# Altium footprint library KM_ALTIUM.PcbLib: 265 footprints (part 10 of 17)
Each footprint in its own frame and in the unit in brackets; x right, y up, seen from the top. Pads: shape width x height; smd on the part's side, far side on the other; paste and mask are expansions set on the pad; w line width, h text height; cw(c..) or ccw(c..) is an arc to the next point about the centre after c.
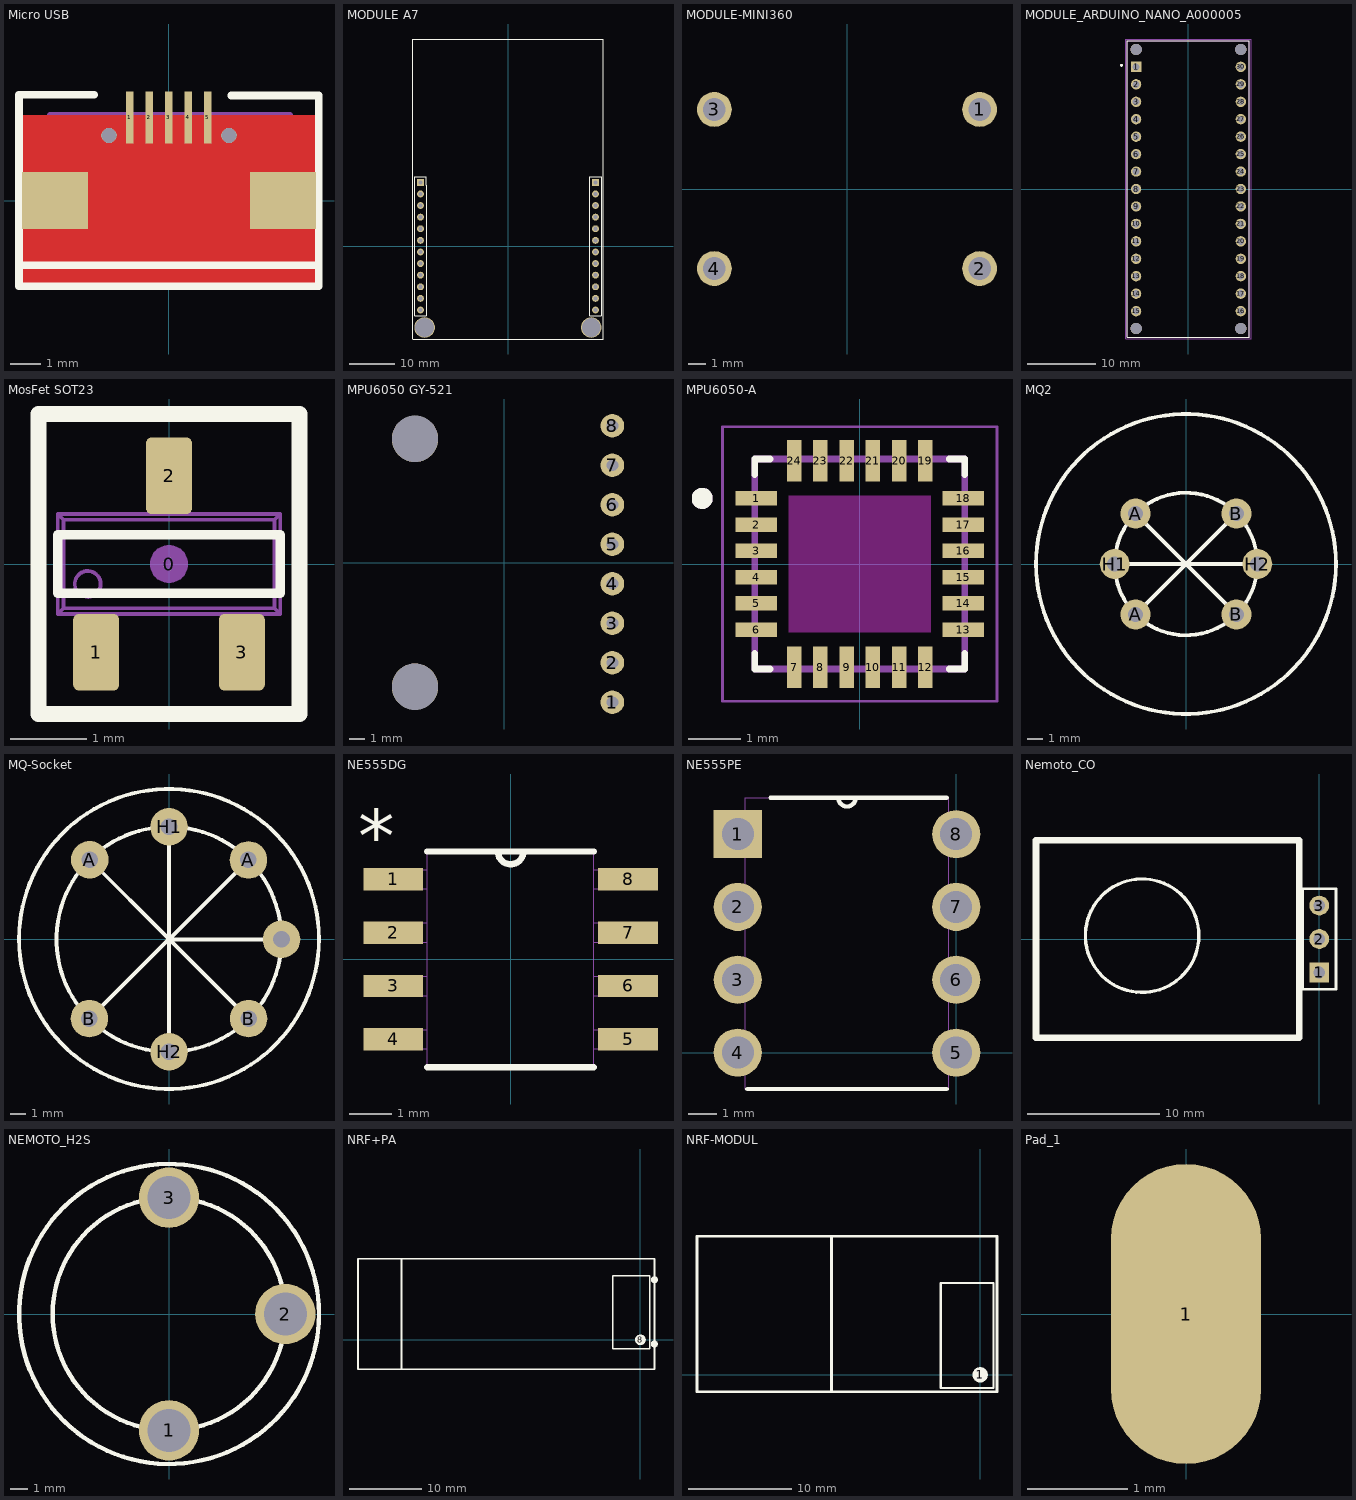
[diagram p9: the footprints below, top view; thin cyan lines are the x and y axes]

## Micro USB [mm]
pads (9):
  rect 0.25x1.75 smd: 1(-1.3,2.774) 2(-0.65,2.774) 3(0,2.774) 4(0.65,2.774) 5(1.3,2.774)
  rect 2.2x1.9 smd: ""(-3.8,0) ""(3.8,0)
  round 0.5 hole 0.5: ""(-2,2.175) ""(2,2.175)
Top Layer:
  pour cut-out: -4.978,-2.87 -4.978,2.851 5.004,2.851 4.978,-2.845
Top Overlay:
  lines w0.254: -5,-2.15 5,-2.15 ; -2.5,3.531 -5,3.531 -5,-2.85 5,-2.85 5,3.505 2.083,3.505
Mechanical 1:
  lines w0.203: -3.961,2.851 -3.955,2.845 -3.955,-2.743 4.033,-2.743 4.033,2.851 -3.961,2.851
3D body "1981568-1.stp": height 2.79, standoff -0.29, extent -3.961,-2.749 4.039,2.851

## MODULE A7 [mm]
pads (26):
  rect 1.5x1.5 hole 0.9: 1(-19.152,13.97) 24(19.152,13.97)
  round 1.5 hole 0.9: 2(-19.152,11.43) 3(-19.152,8.89) 4(-19.152,6.35) 5(-19.152,3.81) 6(-19.152,1.27) 7(-19.152,-1.27) 8(-19.152,-3.81) 9(-19.152,-6.35) 10(-19.152,-8.89) 11(-19.152,-11.43) 12(-19.152,-13.97) 13(19.152,-13.97) 14(19.152,-11.43) 15(19.152,-8.89) 16(19.152,-6.35) 17(19.152,-3.81) 18(19.152,-1.27) 19(19.152,1.27) 20(19.152,3.81) 21(19.152,6.35) 22(19.152,8.89) 23(19.152,11.43)
  round 4.5 hole 4.1: ""(-18.263,-17.805) ""(18.212,-17.805)
Top Overlay:
  lines w0.2: -20.422,-15.24 -20.422,15.24 -17.882,15.24 -17.882,13.335 -17.882,-15.24 -20.422,-15.24 ; 17.882,-15.24 20.422,-15.24 20.422,15.24 17.882,15.24 17.882,-15.24
  lines w0.254: -20.865,-20.32 20.865,-20.32 20.865,45.34 -20.865,45.34 -20.865,-20.295

## MODULE-MINI360 [mm]
pads (4):
  round 2 hole 1.3 mask+0: 1(7.62,4.572) 2(7.62,-4.572) 3(-7.62,4.572) 4(-7.62,-4.572)
3D body "MIni - 360.step": height 3.75, standoff 0, extent -9,-6 9,6

## MODULE_ARDUINO_NANO_A000005 [mm]
pads (34):
  rect 1.508x1.508 / inner round 1.508 / far side rect 1.508x1.508 hole 1: 1(-7.62,17.78)
  round 1.508 hole 1: 2(-7.62,15.24) 3(-7.62,12.7) 4(-7.62,10.16) 5(-7.62,7.62) 6(-7.62,5.08) 7(-7.62,2.54) 8(-7.62,0) 9(-7.62,-2.54) 10(-7.62,-5.08) 11(-7.62,-7.62) 12(-7.62,-10.16) 13(-7.62,-12.7) 14(-7.62,-15.24) 15(-7.62,-17.78) 16(7.62,-17.78) 17(7.62,-15.24) 18(7.62,-12.7) 19(7.62,-10.16) 20(7.62,-7.62) 21(7.62,-5.08) 22(7.62,-2.54) 23(7.62,0) 24(7.62,2.54) 25(7.62,5.08) 26(7.62,7.62) 27(7.62,10.16) 28(7.62,12.7) 29(7.62,15.24) 30(7.62,17.78)
  round 1.651 hole 1.651 unplated: ""(-7.62,-20.32) ""(-7.62,20.32) ""(7.62,-20.32) ""(7.62,20.32)
Top Overlay:
  circle w0.2: c-9.75,18 r0.1
  lines w0.127: -8.89,-21.59 8.89,-21.59 8.89,21.59 -8.89,21.59 -8.89,-21.59
Mechanical 13:
  circle w0.2: c-9.75,18 r0.1
  lines w0.127: -8.89,-21.59 -8.89,21.59 8.89,21.59 8.89,-21.59 -8.89,-21.59
Mechanical 15:
  lines w0.05: -9.14,-21.84 9.14,-21.84 9.14,21.84 -9.14,21.84 -9.14,-21.84
3D body "step_temp.STEP": height 12.6, standoff -6, extent -9,-23.4 9,21.6

## MosFet SOT23 [mm]
pads (4):
  round 0.5 on Mech15: 0(0,0)
  rrect25% 0.6x1 smd: 1(-0.95,-1.15) 2(0,1.15) 3(0.95,-1.15)
Top Overlay:
  lines w0.127: -1.45,-0.381 -1.45,0.381 1.45,0.381 1.45,-0.381 -1.45,-0.381
  lines w0.203: -1.702,-1.956 -1.702,1.956 1.702,1.956 1.702,-1.956 -1.702,-1.956
Mechanical 13:
  circle w0.05: c-1.06,-0.26 r0.169
  lines w0.05: -1.19,-1.19 -0.71,-1.19 ; -1.19,-1.099 -0.71,-1.099 ; -1.19,-1.074 -0.71,-1.074 ; -1.19,-0.825 -0.71,-0.825 ; -1.19,-0.65 -1.19,-1.4 -0.71,-1.4 -0.71,-0.65 ; -0.24,0.65 -0.24,1.4 0.24,1.4 0.24,0.65 ; -0.24,0.825 0.24,0.825 ; -0.24,1.074 0.24,1.074 ; -0.24,1.099 0.24,1.099 ; -0.24,1.19 0.24,1.19 ; 0.71,-1.19 1.19,-1.19 ; 0.71,-1.099 1.19,-1.099 ; 0.71,-1.074 1.19,-1.074 ; 0.71,-0.825 1.19,-0.825 ; 0.71,-0.65 0.71,-1.4 1.19,-1.4 1.19,-0.65 ; -1.45,-0.65 -1.45,0.65 ; -1.45,-0.65 -1.376,-0.576 ; -1.45,-0.65 1.45,-0.65 ; -1.45,0.65 -1.376,0.576 ; -1.45,0.65 1.45,0.65 ; -1.376,-0.576 1.376,-0.576 ; -1.376,-0.576 -1.376,0.576 ; -1.376,0.576 1.376,0.576 ; 1.376,-0.576 1.376,0.576 ; 1.376,-0.576 1.45,-0.65 ; 1.376,0.576 1.45,0.65 ; 1.45,-0.65 1.45,0.65
Mechanical 15:
  lines w0.076: -1.75,-1.9 1.75,-1.9 1.75,1.9 -1.75,1.9 -1.75,-1.9
3D body "SOT23-3.STEP": height 1.29, standoff -0.01, extent -1.45,-1.4 1.45,1.4

## MPU6050 GY-521 [mm] "mODULE"
pads (10):
  round 1.524 hole 0.762: 1(7,-9) 2(7,-6.45) 3(7,-3.9) 4(7,-1.35) 5(7,1.2) 6(7,3.75) 7(7,6.3) 8(7,8.85)
  round 3 hole 3: ""(-5.75,-8) ""(-5.75,8)
3D body "MPU_6050.step": height 3, standoff 0, extent -8,-10.25 8,10.25

## MPU6050-A [mm] "SMD"
height 0.95
pads (24):
  rect 0.79x0.28 smd: 1(-1.97,1.25) 2(-1.97,0.75) 3(-1.97,0.25) 4(-1.97,-0.25) 5(-1.97,-0.75) 6(-1.97,-1.25) 13(1.97,-1.25) 14(1.97,-0.75) 15(1.97,-0.25) 16(1.97,0.25) 17(1.97,0.75) 18(1.97,1.25)
  rect 0.28x0.79 smd: 7(-1.25,-1.97) 8(-0.75,-1.97) 9(-0.25,-1.97) 10(0.25,-1.97) 11(0.75,-1.97) 12(1.25,-1.97) 19(1.25,1.97) 20(0.75,1.97) 21(0.25,1.97) 22(-0.25,1.97) 23(-0.75,1.97) 24(-1.25,1.97)
Top Overlay:
  circle w0.2: c-3,1.25 r0.1
  lines w0.127: -2,-1.705 -2,-2 -1.705,-2 ; -2,1.705 -2,2 -1.705,2 ; 1.705,-2 2,-2 2,-1.705 ; 1.705,2 2,2 2,1.705
Keep-Out Layer:
  region: 1.35,-1.3 -1.35,-1.3 -1.35,1.3 1.35,1.3
Mechanical 13:
  circle w0.2: c-3,1.25 r0.1
  lines w0.127: -2,-2 -2,2 2,2 2,-2 -2,-2
Mechanical 15:
  lines w0.05: -2.615,-2.615 -2.615,2.615 2.615,2.615 2.615,-2.615 -2.615,-2.615
3D body "MPU-6050-A.STEP": height 0.93, standoff -0.02, extent -2,-2 2,2

## MQ2 [mm]
pads (6):
  round 2 hole 1: A(-3.359,3.359) A(-3.359,-3.359) B(3.359,-3.359) B(3.359,3.359) H1(-4.75,0) H2(4.75,0)
Top Overlay:
  circle w0.254: c0,0 r4.75
  circle w0.254: c0,0 r10
  lines w0.254: -4.75,0 4.75,0 0,0 ; -3.359,-3.359 0,0 ; -3.359,3.359 0,0 ; 3.359,-3.359 0,0 ; 3.359,3.359 0,0
3D body "User Library-MQ-5.STEP": height 16.06, standoff -7, extent -9.5,-9.474 9.5,9.526

## MQ-Socket [mm]
pads (7):
  round 2.5 hole 1.1: A(-5.286,5.306) A(5.299,5.292) B(-5.306,-5.286) B(5.306,-5.286) H1(0,7.5) H2(0,-7.5) ""(7.5,0)
Top Overlay:
  circle w0.254: c0,0.02 r10
  circle w0.254: c0,0 r7.5
  lines w0.254: -5.306,-5.286 0,0.02 ; -5.286,5.306 0,0.02 ; 0,-7.5 0,0.02 ; 0,7.5 0,-0.006 ; 5.299,5.292 0,-0.006 ; 5.306,-5.286 0,0.02 ; 7.494,-0.006 0,-0.006
3D body "User Library-socket-7.STEP": height 12.16, standoff -3.48, extent -8.636,-8.449 8.364,8.551

## NE555DG [mil]
pads (8):
  rect 56x21 smd: 1(-110,75) 2(-110,25) 3(-110,-25) 4(-110,-75) 5(110,-75) 6(110,-25) 7(110,25) 8(110,75)
Top Overlay:
  lines w6: -78,-101 78,-101 ; -78,101 -12,101 ; 78,101 12,101 ; -12,101 ccw(c0,101) 12,101 ; -12,101 12,101
  text "*" at -143,91 h50
Mechanical 13:
  lines w0: -12,101 ccw(c0,101) 12,101 ; -12,101 12,101 ; -12,101 -78,101 -78,-101 78,-101 78,101 12,101 ; -124,-84 -124,-66 -78,-66 -78,-84 -124,-84 ; -124,-34 -124,-16 -78,-16 -78,-34 -124,-34 ; -124,16 -124,34 -78,34 -78,16 -124,16 ; -124,66 -124,84 -78,84 -78,66 -124,66 ; 78,-84 78,-66 124,-66 124,-84 78,-84 ; 78,-34 78,-16 124,-16 124,-34 78,-34 ; 78,16 78,34 124,34 124,16 78,16 ; 78,66 78,84 124,84 124,66 78,66
  text "*" at -143,91 h50
3D body "step_temp.STEP": height 68.9, standoff 0, extent -118.11,-96.46 118.11,96.46

## NE555PE [mil]
pads (8):
  rect 66x66 / inner round 66 / far side rect 66x66 hole 44: 1(-300,300)
  round 66 hole 44: 2(-300,200) 3(-300,100) 4(-300,0) 5(0,0) 6(0,100) 7(0,200) 8(0,300)
Top Overlay:
  lines w6: -287,-50 -13,-50 ; -255,350 -162,350 ; -13,350 -138,350 ; -162,350 ccw(c-150,350) -138,350 ; -162,350 -138,350
Mechanical 13:
  lines w0: -162,350 ccw(c-150,350) -138,350 ; -162,350 -290,350 -290,-50 -10,-50 -10,350 -138,350 ; -162,350 -138,350 ; -322,-22 -290,-22 -290,22 -322,22 -322,-22 ; -322,78 -290,78 -290,122 -322,122 -322,78 ; -322,178 -290,178 -290,222 -322,222 -322,178 ; -322,278 -290,278 -290,322 -322,322 -322,278 ; -10,-22 22,-22 22,22 -10,22 -10,-22 ; -10,78 22,78 22,122 -10,122 -10,78 ; -10,178 22,178 22,222 -10,222 -10,178 ; -10,278 22,278 22,322 -10,322 -10,278
3D body "step_temp.STEP": height 210, standoff -150, extent -359.99,-33.75 70,343.75

## Nemoto_CO [mm]
pads (3):
  rect 1.5x1.5 hole 0.9: 1(0,-2.54)
  round 1.5 hole 0.9: 2(0,0) 3(0,2.54)
Top Overlay:
  circle w0.254: c-13.462,0.254 r4.311
  lines w0.2: -1.27,-3.81 -1.27,3.81 1.27,3.81 1.27,-3.81 -1.27,-3.81
  lines w0.508: -21.524,-7.5 -21.524,7.5 -1.524,7.5 -1.524,-7.5 -21.524,-7.5
3D body: height 7, standoff 2, extent -21.59,-7.366 -1.524,7.366

## NEMOTO_H2S [mm]
pads (3):
  round 3.5 hole 2.5: 1(0,-6.75) 2(6.75,0) 3(0,6.75)
Top Overlay:
  circle w0.254: c0,0 r8.7
  circle w0.254: c0,0 r6.75
3D body: height 15, standoff 5, extent -10.025,-10.073 9.975,9.921
3D body: height 7, standoff 2, extent -8.7,-8.697 8.7,8.698

## NRF+PA [mm]
pads (3):
  round 1 on Top Overlay: 1(1.93,-0.58) 8(1.93,8.31)
  round 1.5 on Top Overlay: 8(0,0)
Top Overlay:
  lines w0.2: -3.81,-1.27 -3.81,8.89 1.27,8.89 1.27,-1.27 -3.81,-1.27
  lines w0.254: -33.07,-4.08 -33.07,11.22 ; -39.07,-4.08 -39.07,11.22 1.93,11.22 1.93,-4.08 -39.07,-4.08

## NRF-MODUL [mm]
pads (1):
  round 1.5 on Top Overlay: 1(0,0)
Top Overlay:
  lines w0.2: -3.81,-1.27 1.27,-1.27 1.27,8.89 -3.81,8.89 -3.81,-1.27
  lines w0.254: -14.374,-1.626 -14.374,13.233 ; -27.374,-1.626 -27.374,13.374 1.626,13.374 1.626,-1.626 -27.374,-1.626

## Pad_1 [mm]
pads (1):
  oval 1.5x3 smd: 1(0,0)